# Altium schematic symbol library PMR25HZPFV1L00.SchLib: 1 symbol
Pins are listed as number, name and electrical type; pins without a type are passive.

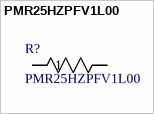
[diagram p0: symbol PMR25HZPFV1L00]

## PMR25HZPFV1L00
designator R?
No Description Available; Manufacturer_Name: ROHM Semiconductor; Copyright: Copyright (C) 2026 Ultra Librarian. All rights reserved.; Manufacturer_Part_Number: PMR25HZPFV1L00
footprint RES_R1210_ROM
pins: 1, 2